# Altium schematic symbol library sma.SchLib: 1 symbol
Pins are listed as number, name and electrical type; pins without a type are passive.

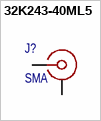
[diagram p0: symbol 32K243-40ML5]

## 32K243-40ML5
designator J?, comment SMA
Rf Coaxial Connector, 50 Ohm, In-series, Sma Right Angle Jack Pcb, Sma Series; Manufacturer: Rosenberger; Manufacturer Part Number: 32K243-40ML5; Contact Resistance: 3mΩ; Contact Style: Coax; Dielectric Material: PTFE; Frequency: 18GHz; Gender: Female; Impedance: 50Ω; Insertion Loss (dB): 0.17dB; Insulation Resistance: 5GΩ; Number of Contacts: 1; Voltage Rating: 480V; Supplier: Mouser; Supplier Part Number: 476-32K243-40ML5; RoHS: Compliant; Category: RF / Coaxial Connectors; Stock: 5444; Pricing: 1=20.21, 10=17.36, 50=15.71, 100=14.66, 1000=13.36, 10000=13.36 (USD); Ambient Temperature Range High: 165°C; Case/Package: SMA; China RoHS: Non-Compliant; Contact Material: Gold; Contact Plating: Gold; Export Control Classification Number (ECCN) Code: EAR99; Fastening Type: Threaded; Harmonized Tariff Schedule (HTS) Code: 8536.69.40.10; Introduction Date: 2007-04-18; Lifecycle Status: Production; Max Operating Temperature: 165°C; Manufacturer Package Identifier: 32K243-40ML5; Min Operating Temperature: -65°C; Number of Ports: 1; Number of Positions: 1; Orientation: Right Angle; REACH SVHC: Affected; ComponentLink1URL: https://sigma.octopart.com:443/138897775/technical_drawing/Rosenberger-32K243-40ML5.pdf?src-supplier=Upverter; ComponentLink1Description: https://sigma.octopart.com:443/138897775/technical_drawing/Rosenberger-32K243-40ML5.pdf?src-supplier=Upverter; ComponentLink2URL: https://datasheet.octopart.com:443/32K243-40ML5-Rosenberger-datasheet-136490776.pdf?src-supplier=Upverter; ComponentLink2Description: https://datasheet.octopart.com:443/32K243-40ML5-Rosenberger-datasheet-136490776.pdf?src-supplier=Upverter; ComponentLink3URL: https://datasheet.octopart.com:443/32K243-40ML5-Rosenberger-datasheet-181232220.pdf?src-supplier=IHS; ComponentLink3Description: https://datasheet.octopart.com:443/32K243-40ML5-Rosenberger-datasheet-181232220.pdf?src-supplier=IHS; ComponentLink4URL: https://datasheet.octopart.com:443/32K243-40ML5-Rosenberger-datasheet-154574681.pdf?src-supplier=RS+(Formerly+Allied+Electronics); ComponentLink4Description: https://datasheet.octopart.com:443/32K243-40ML5-Rosenberger-datasheet-154574681.pdf?src-supplier=RS+(Formerly+Allied+Electronics); Supplier 1: Mouser; Supplier Part Number 1: 476-32K243-40ML5
footprint 32K243-40ML5
pins: 1, 2